# Altium schematic symbol library PS,DC-DC,5Vin,+-12Vout,2W,A0512S-2W.SchLib: 1 symbol
Pins are listed as number, name and electrical type; pins without a type are passive.

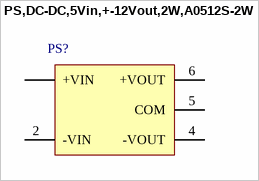
[diagram p0: symbol PS,DC-DC,5Vin,+-12Vout,2W,A0512S-2W]

## PS,DC-DC,5Vin,+-12Vout,2W,A0512S-2W
designator PS?
pins: 1 +VIN (power), 2 -VIN (power), 4 -VOUT (power), 5 COM (power), 6 +VOUT (power)